# Altium footprint library chipfc_libs.PCBLIB: 315 footprints (part 18 of 20)
Each footprint in its own frame and in the unit in brackets; x right, y up, seen from the top. Pads: shape width x height; smd on the part's side, far side on the other; paste and mask are expansions set on the pad; w line width, h text height; cw(c..) or ccw(c..) is an arc to the next point about the centre after c.
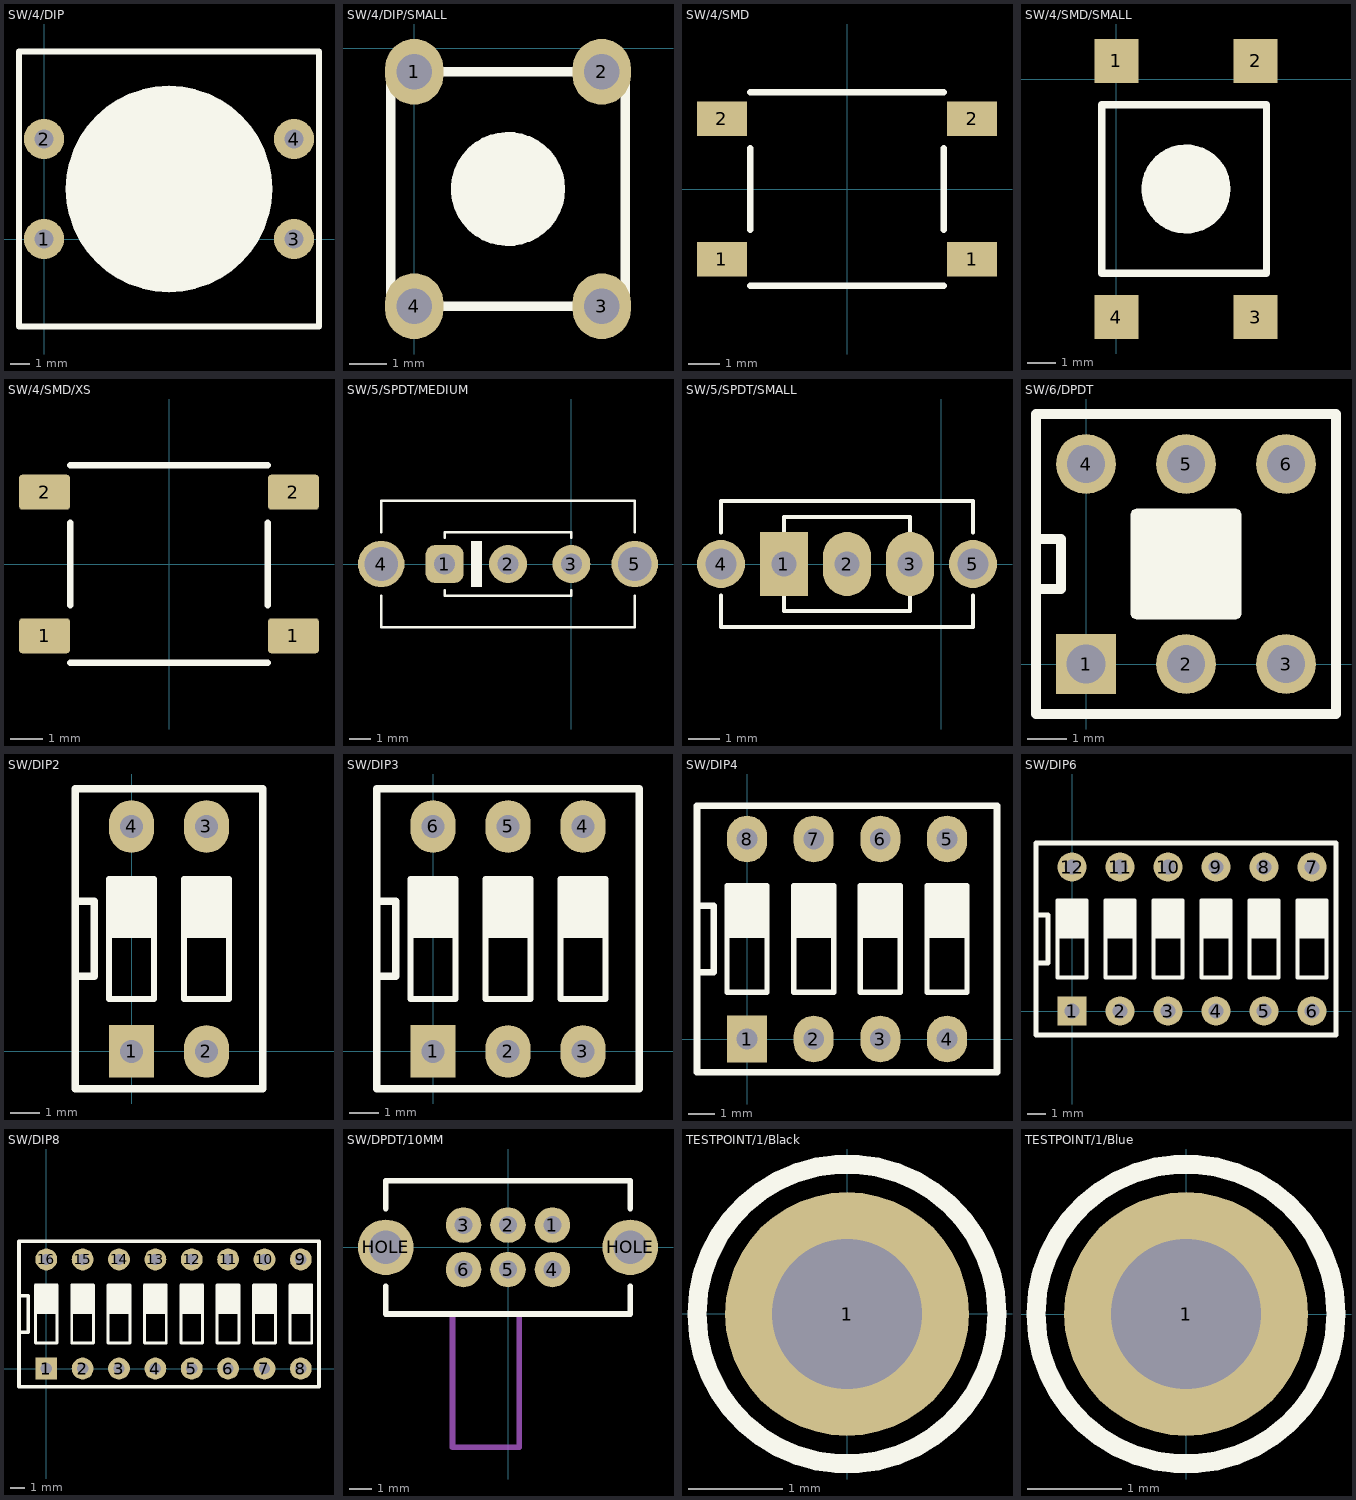
[diagram p17: the footprints below, top view; thin cyan lines are the x and y axes]

## SW/4/DIP [mil]
pads (4):
  round 80 / inner round 62 / far side round 80 hole 38: 1(0,0) 2(0,200) 3(500,0) 4(500,200)
Top Overlay:
  drawing of 6 lines, arcs and shapes, not listed

## SW/4/DIP/SMALL [mil]
pads (4):
  oval 62x70 / inner round 60 / far side oval 62x70 hole 38: 1(0,-25) 2(200,-25) 3(200,-275) 4(0,-275)
Top Overlay:
  circle w10: c100,-150 r55.9
  region: 114.66,-95 114.73,-95.04 114.8,-95.04 128.4,-100.67 128.45,-100.72 128.52,-100.74 140.2,-109.7 140.24,-109.76 140.3,-109.8 149.26,-121.48 149.28,-121.55 149.33,-121.6 154.96,-135.2 154.96,-135.27 155,-135.34 156.92,-149.93 156.9,-150 156.92,-150.07 155,-164.66 154.96,-164.73 154.96,-164.8 149.33,-178.4 149.28,-178.45 149.26,-178.52 140.3,-190.2 140.24,-190.24 140.2,-190.3 128.52,-199.26 128.45,-199.28 128.4,-199.33 114.8,-204.96 114.73,-204.96 114.66,-205 100.07,-206.92 100,-206.9 99.93,-206.92 85.34,-205 85.27,-204.96 85.2,-204.96 71.6,-199.33 71.55,-199.28 71.48,-199.26 59.8,-190.3 59.76,-190.24 59.7,-190.2 50.74,-178.52 50.72,-178.45 50.67,-178.4 45.04,-164.8 45.04,-164.73 45,-164.66 43.08,-150.07 43.1,-150 43.08,-149.93 45,-135.34 45.04,-135.27 45.04,-135.2 49.37,-124.73 49.39,-124.72 49.39,-124.69 49.53,-124.57 49.67,-124.44 49.68,-124.44 49.77,-124.26 49.75,-124.24 49.75,-124.21 49.73,-124.19 49.75,-124.01 49.75,-123.82 50.67,-121.6 50.72,-121.55 50.74,-121.48 59.7,-109.8 59.76,-109.76 59.8,-109.7 71.48,-100.74 71.55,-100.72 71.6,-100.67 85.2,-95.04 85.27,-95.04 85.34,-95 99.93,-93.08 100,-93.1 100.07,-93.08
  lines w10: -25,-275 225,-275 225,-25 -25,-25 -25,-275

## SW/4/SMD [mm]
pads (4):
  rect 1.6x1.1 smd: 1(-4,-2.25) 1(4,-2.25) 2(-4,2.25) 2(4,2.25)
Top Overlay:
  lines w0.203: -3.1,-3.1 3.1,-3.1 ; -3.1,-1.3 -3.1,1.3 ; -3.1,3.1 3.1,3.1 ; 3.1,-1.3 3.1,1.3
3D body "User Library-PTS645SL70SMTR92-LFS.STEP": height 7, standoff 0, extent -4.5,-3 4.5,3

## SW/4/SMD/SMALL [mil]
pads (4):
  rect 60x60 smd: 1(0,25) 2(190,25) 3(190,-325) 4(0,-325)
Top Overlay:
  circle w10: c95,-150 r55.9
  region: 109.66,-95 109.73,-95.04 109.8,-95.04 123.4,-100.67 123.45,-100.72 123.52,-100.74 135.2,-109.7 135.24,-109.76 135.3,-109.8 144.26,-121.48 144.28,-121.55 144.33,-121.6 149.96,-135.2 149.96,-135.27 150,-135.34 151.92,-149.93 151.9,-150 151.92,-150.07 150,-164.66 149.96,-164.73 149.96,-164.8 144.33,-178.4 144.28,-178.45 144.26,-178.52 135.3,-190.2 135.24,-190.24 135.2,-190.3 123.52,-199.26 123.45,-199.28 123.4,-199.33 109.8,-204.96 109.73,-204.96 109.66,-205 95.07,-206.92 95,-206.9 94.93,-206.92 80.34,-205 80.27,-204.96 80.2,-204.96 66.6,-199.33 66.55,-199.28 66.48,-199.26 54.8,-190.3 54.76,-190.24 54.7,-190.2 45.74,-178.52 45.72,-178.45 45.67,-178.4 40.04,-164.8 40.04,-164.73 40,-164.66 38.08,-150.07 38.1,-150 38.08,-149.93 40,-135.34 40.04,-135.27 40.04,-135.2 44.37,-124.73 44.39,-124.72 44.39,-124.69 44.53,-124.57 44.67,-124.44 44.68,-124.44 44.77,-124.26 44.75,-124.24 44.75,-124.21 44.73,-124.19 44.75,-124.01 44.75,-123.82 45.67,-121.6 45.72,-121.55 45.74,-121.48 54.7,-109.8 54.76,-109.76 54.8,-109.7 66.48,-100.74 66.55,-100.72 66.6,-100.67 80.2,-95.04 80.27,-95.04 80.34,-95 94.93,-93.08 95,-93.1 95.07,-93.08
  lines w10: -20,-265 205,-265 205,-35 -20,-35 -20,-265

## SW/4/SMD/XS [mm]
pads (4):
  rrect20% 1.6x1.1 smd: 1(-3.9,-2.25) 1(3.9,-2.25) 2(-3.9,2.25) 2(3.9,2.25)
Top Overlay:
  lines w0.203: -3.1,-3.1 3.1,-3.1 ; -3.1,-1.3 -3.1,1.3 ; -3.1,3.1 3.1,3.1 ; 3.1,-1.3 3.1,1.3
3D body "User Library-PTS645SL70SMTR92-LFS.STEP": height 7, standoff 0, extent -4.5,-3 4.5,3

## SW/5/SPDT/MEDIUM [mm]
pads (5):
  rrect50% 1.8x1.8 hole 1: 1(-6,0)
  round 1.8 hole 1: 2(-3,0) 3(0,0)
  round 2.2 hole 1.6: 4(-9,0) 5(3,0)
Top Overlay:
  region: -4.25,1.069 -4.25,-1.069 -4.75,-1.069 -4.75,1.069
  lines w0.127: -8.999,-1.5 -8.999,-3 3,-3 3,-1.5 ; -8.999,1.5 -8.999,3 3,3 3,1.5 ; -5.999,-1.25 -5.999,-1.5 0,-1.5 0,-1.25 ; -5.999,1.25 -5.999,1.5 0,1.5 0,1.25
3D body: height 6.5, standoff 0, extent -9.25,-3 3.25,3
3D body: height 15, standoff 6.5, extent -6,-1.5 -3,1.5

## SW/5/SPDT/SMALL [mil]
pads (5):
  rect 60x80 / inner round 60 / far side rect 60x80 hole 31: 1(-196.85,0)
  oval 60x80 / inner round 60 / far side oval 60x80 hole 31: 2(-118.1,0) 3(-39.37,0)
  round 60 hole 39: 4(-275.58,0) 5(39.37,0)
Top Overlay:
  lines w5: -275.57,-39.37 -275.57,-78.73 39.37,-78.73 39.37,-39.37 ; -275.57,39.37 -275.57,78.73 39.37,78.73 39.37,39.37 ; -196.83,-39.37 -196.83,-59.05 -39.37,-59.05 -39.37,-39.37 ; -196.83,39.37 -196.83,59.05 -39.37,59.05 -39.37,39.37

## SW/6/DPDT [mil]
pads (6):
  rect 60x60 / inner round 60 / far side rect 60x80 hole 39: 1(0,0)
  round 60 / inner round 60 / far side oval 60x80 hole 38: 2(100,0) 3(200,0) 4(0,200) 5(100,200) 6(200,200)
Top Overlay:
  region: 153.83,153.83 155.41,150 155.41,50 153.83,46.17 150,44.59 50,44.59 46.17,46.17 44.59,50 44.59,150 46.17,153.83 50,155.41 150,155.41
  lines w10: -50,75 -25,75 -25,125 -50,125 ; -50,-50 250,-50 250,250 -50,250 -50,-50

## SW/DIP2 [mil]
pads (4):
  rect 60x70 hole 31: 1(0,0)
  oval 60x70 hole 31: 2(100,0) 3(100,300) 4(0,300)
Top Overlay:
  region: 30.75,233.47 31.06,232.72 31.06,152.72 30.75,151.96 30,151.65 -30,151.65 -30.75,151.96 -31.06,152.72 -31.06,232.72 -30.75,233.47 -30,233.78 30,233.78
  region: 130.75,233.47 131.06,232.72 131.06,152.72 130.75,151.96 130,151.65 70,151.65 69.25,151.96 68.94,152.72 68.94,232.72 69.25,233.47 70,233.78 130,233.78
  lines w1.97: -30,152.72 -30,232.72 -20,232.72 30,232.72 30,152.72 -30,152.72 ; 70,152.72 130,152.72 130,232.72 80,232.72 70,232.72 70,152.72
  lines w8: -30,70 30,70 30,230 -30,230 -30,70 ; 70,70 130,70 130,230 70,230 70,70
  lines w10: -75,100 -50,100 -50,200 -75,200 ; -75,-50 175,-50 175,350 -75,350 -75,-50
3D body "User Library-DIP-Schalter SMD 2polig RM2 54.step": height 164.92, standoff -0.43, extent -50,0 150,300

## SW/DIP3 [mil]
pads (6):
  rect 60x70 hole 31: 1(0,0)
  oval 60x70 hole 31: 2(100,0) 3(200,0) 4(200,300) 5(100,300) 6(0,300)
Top Overlay:
  region: 30.75,233.47 31.06,232.72 31.06,152.72 30.75,151.96 30,151.65 -30,151.65 -30.75,151.96 -31.06,152.72 -31.06,232.72 -30.75,233.47 -30,233.78 30,233.78
  region: 130.75,233.47 131.06,232.72 131.06,152.72 130.75,151.96 130,151.65 70,151.65 69.25,151.96 68.94,152.72 68.94,232.72 69.25,233.47 70,233.78 130,233.78
  region: 230.75,233.47 231.06,232.72 231.06,152.72 230.75,151.96 230,151.65 170,151.65 169.25,151.96 168.94,152.72 168.94,232.72 169.25,233.47 170,233.78 230,233.78
  lines w1.97: -30,152.72 30,152.72 30,232.72 -20,232.72 -30,232.72 -30,152.72 ; 70,152.72 70,232.72 80,232.72 130,232.72 130,152.72 70,152.72 ; 170,152.72 230,152.72 230,232.72 170,232.72 170,152.72
  lines w8: -30,70 -30,230 30,230 30,70 -30,70 ; 70,70 70,230 130,230 130,70 70,70 ; 170,70 230,70 230,230 170,230 170,70
  lines w10: -75,100 -50,100 -50,200 -75,200 ; -75,-50 275,-50 275,350 -75,350 -75,-50
3D body "User Library-DIP-Schalter SMD 3polig RM2 54.step": height 164.92, standoff -0.43, extent -50,0 250,300

## SW/DIP4 [mil]
pads (8):
  rect 60x70 hole 31: 1(0,0)
  oval 60x70 hole 31: 2(100,0) 3(200,0) 4(300,0) 5(300,300) 6(200,300) 7(100,300) 8(0,300)
Top Overlay:
  region: 230.75,233.47 231.06,232.72 231.06,152.72 230.75,151.96 230,151.65 170,151.65 169.25,151.96 168.94,152.72 168.94,232.72 169.25,233.47 170,233.78 230,233.78
  region: 330.75,233.47 331.06,232.72 331.06,152.72 330.75,151.96 330,151.65 270,151.65 269.25,151.96 268.94,152.72 268.94,232.72 269.25,233.47 270,233.78 330,233.78
  region: 30.75,233.47 31.06,232.72 31.06,152.72 30.75,151.96 30,151.65 -30,151.65 -30.75,151.96 -31.06,152.72 -31.06,232.72 -30.75,233.47 -30,233.78 30,233.78
  region: 130.75,233.47 131.06,232.72 131.06,152.72 130.75,151.96 130,151.65 70,151.65 69.25,151.96 68.94,152.72 68.94,232.72 69.25,233.47 70,233.78 130,233.78
  lines w1.97: -30,152.72 30,152.72 30,232.72 -20,232.72 -30,232.72 -30,152.72 ; 70,152.72 130,152.72 130,232.72 80,232.72 70,232.72 70,152.72 ; 170,152.72 170,232.72 230,232.72 230,152.72 170,152.72 ; 270,152.72 270,232.72 330,232.72 330,152.72 270,152.72
  lines w8: -30,70 -30,230 30,230 30,70 -30,70 ; 70,70 70,230 130,230 130,70 70,70 ; 170,70 230,70 230,230 170,230 170,70 ; 270,70 330,70 330,230 270,230 270,70
  lines w10: -75,100 -50,100 -50,200 -75,200 ; -75,-50 375,-50 375,350 -75,350 -75,-50
3D body "User Library-DIP-Schalter SMD 4polig RM2 54.step": height 164.92, standoff -0.43, extent -50,0 350,300

## SW/DIP6 [mil]
pads (12):
  rect 60x60 / inner rect 60x80 / far side rect 60x80 hole 31: 1(0,0)
  round 60 / inner oval 60x80 / far side oval 60x80 hole 31: 2(100,0) 3(200,0) 4(300,0) 5(400,0) 6(500,0) 7(500,300) 8(400,300) 9(300,300) 10(200,300) 11(100,300) 12(0,300)
Top Overlay:
  region: 530.75,233.47 531.06,232.72 531.06,152.72 530.75,151.96 530,151.65 470,151.65 469.25,151.96 468.94,152.72 468.94,232.72 469.25,233.47 470,233.78 530,233.78
  region: 430.75,233.47 431.06,232.72 431.06,152.72 430.75,151.96 430,151.65 370,151.65 369.25,151.96 368.94,152.72 368.94,232.72 369.25,233.47 370,233.78 430,233.78
  region: 130.75,233.47 131.06,232.72 131.06,152.72 130.75,151.96 130,151.65 70,151.65 69.25,151.96 68.94,152.72 68.94,232.72 69.25,233.47 70,233.78 130,233.78
  region: 230.75,233.47 231.06,232.72 231.06,152.72 230.75,151.96 230,151.65 170,151.65 169.25,151.96 168.94,152.72 168.94,232.72 169.25,233.47 170,233.78 230,233.78
  region: 30.75,233.47 31.06,232.72 31.06,152.72 30.75,151.96 30,151.65 -30,151.65 -30.75,151.96 -31.06,152.72 -31.06,232.72 -30.75,233.47 -30,233.78 30,233.78
  region: 330.75,233.47 331.06,232.72 331.06,152.72 330.75,151.96 330,151.65 270,151.65 269.25,151.96 268.94,152.72 268.94,232.72 269.25,233.47 270,233.78 330,233.78
  lines w1.97: -30,152.72 30,152.72 30,232.72 -20,232.72 -30,232.72 -30,152.72 ; 70,152.72 130,152.72 130,232.72 80,232.72 70,232.72 70,152.72 ; 170,152.72 170,232.72 230,232.72 230,152.72 170,152.72 ; 270,152.72 270,232.72 330,232.72 330,152.72 270,152.72 ; 370,152.72 370,232.72 380,232.72 430,232.72 430,152.72 370,152.72 ; 470,152.72 530,152.72 530,232.72 480,232.72 470,232.72 470,152.72
  lines w8: -30,70 -30,230 30,230 30,70 -30,70 ; 70,70 70,230 130,230 130,70 70,70 ; 170,70 230,70 230,230 170,230 170,70 ; 270,70 330,70 330,230 270,230 270,70 ; 370,70 430,70 430,230 370,230 370,70 ; 470,70 530,70 530,230 470,230 470,70
  lines w10: -75,100 -50,100 -50,200 -75,200 ; -75,-50 550,-50 550,350 -75,350 -75,-50

## SW/DIP8 [mil]
pads (16):
  rect 60x60 / inner rect 60x80 / far side rect 60x80 hole 31: 1(0,0)
  round 60 / inner oval 60x80 / far side oval 60x80 hole 31: 2(100,0) 3(200,0) 4(300,0) 5(400,0) 6(500,0) 7(600,0) 8(700,0) 9(700,300) 10(600,300) 11(500,300) 12(400,300) 13(300,300) 14(200,300) 15(100,300) 16(0,300)
Top Overlay:
  drawing of 85 lines, arcs and shapes, not listed

## SW/DPDT/10MM [mm]
pads (8):
  round 1.6 hole 0.8: 1(2,1) 2(0,1) 3(-2,1) 4(2,-1) 5(0,-1) 6(-2,-1)
  round 2.5 hole 1.5: HOLE(-5.5,0) HOLE(5.5,0)
Top Overlay:
  lines w0.254: -5.5,-1.75 -5.5,-3 5.5,-3 5.5,-1.75 ; -5.5,1.75 -5.5,3 5.5,3 5.5,1.75
Mechanical 1:
  lines w0.254: -2.5,-3 -2.5,-9 0.5,-9 0.5,-3
3D body: height 5, standoff 0, extent -5.5,-3 5.5,3
3D body: height 4.5, standoff 1.5, extent -2.5,-9 0.5,-3

## TESTPOINT/1/Black [mm]
pads (1):
  round 2.6 hole 1.6: 1(0,0)
Top Overlay:
  circle w0.203: c0,0 r1.6
3D body "User Library-TEST POINT BLK Keystone 5011.step": height 8.13, standoff -3.1, extent -1.588,-1.588 1.587,1.587

## TESTPOINT/1/Blue [mm]
pads (1):
  round 2.6 hole 1.6: 1(0,0)
Top Overlay:
  circle w0.203: c0,0 r1.6
3D body "User Library-TEST POINT BLU Keystone 5127.step": height 8.13, standoff -3.1, extent -1.587,-1.587 1.588,1.588